# Altium footprint library STM32.PcbLib: 1 footprints
Each footprint in its own frame and in the unit in brackets; x right, y up, seen from the top. Pads: shape width x height; smd on the part's side, far side on the other; paste and mask are expansions set on the pad; w line width, h text height; cw(c..) or ccw(c..) is an arc to the next point about the centre after c.
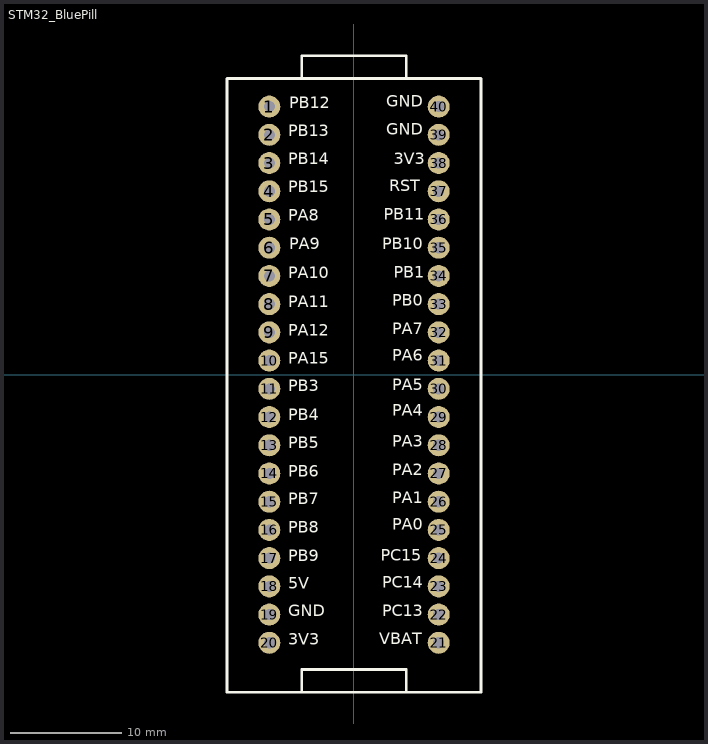
[diagram p0: the footprint, top view; thin cyan lines are the x and y axes]

## STM32_BluePill [mm]
pads (40):
  round 1.98 hole 1: 1(-7.62,24.13) 2(-7.62,21.59) 3(-7.62,19.05) 4(-7.62,16.51) 5(-7.62,13.97) 6(-7.62,11.43) 7(-7.62,8.89) 8(-7.62,6.35) 9(-7.62,3.81) 10(-7.62,1.27) 11(-7.62,-1.27) 12(-7.62,-3.81) 13(-7.62,-6.35) 14(-7.62,-8.89) 15(-7.62,-11.43) 16(-7.62,-13.97) 17(-7.62,-16.51) 18(-7.62,-19.05) 19(-7.62,-21.59) 20(-7.62,-24.13) 21(7.62,-24.13) 22(7.62,-21.59) 23(7.62,-19.05) 24(7.62,-16.51) 25(7.62,-13.97) 26(7.62,-11.43) 27(7.62,-8.89) 28(7.62,-6.35) 29(7.62,-3.81) 30(7.62,-1.27) 31(7.62,1.27) 32(7.62,3.81) 33(7.62,6.35) 34(7.62,8.89) 35(7.62,11.43) 36(7.62,13.97) 37(7.62,16.51) 38(7.62,19.05) 39(7.62,21.59) 40(7.62,24.13)
Top Overlay:
  lines w0.254: -11.43,-28.575 11.43,-28.575 11.43,26.67 -11.43,26.67 -11.43,-28.575 ; -4.699,-28.575 4.699,-28.575 4.699,-26.543 -4.699,-26.543 -4.699,-28.575 ; -4.699,26.67 4.699,26.67 4.699,28.702 -4.699,28.702 -4.699,26.67
  text "3V3" at -5.913,-24.669 h1.78
  text "PB9" at -5.913,-17.151 h1.78
  text "PB8" at -5.913,-14.585 h1.78
  text "GND" at -5.913,-22.104 h1.78
  text "5V" at -5.913,-19.614 h1.78
  text "PB7" at -5.913,-12.04 h1.78
  text "PA11" at -5.913,5.715 h1.78
  text "PB5" at -5.913,-6.991 h1.78
  text "PB6" at -5.913,-9.531 h1.78
  text "PA15" at -5.913,0.629 h1.78
  text "PA10" at -5.913,8.3 h1.78
  text "PB4" at -5.913,-4.445 h1.78
  text "PA9" at -5.842,10.942 h1.78
  text "PA8" at -5.913,13.482 h1.78
  text "PB3" at -5.913,-1.86 h1.78
  text "PA12" at -5.913,3.15 h1.78
  text "PA5" at 3.429,-1.758 h1.78
  text "PA3" at 3.429,-6.838 h1.78
  text "PA1" at 3.429,-11.938 h1.78
  text "PC15" at 2.413,-17.125 h1.78
  text "PA0" at 3.429,-14.331 h1.78
  text "PA4" at 3.429,-4.064 h1.78
  text "PA2" at 3.429,-9.398 h1.78
  text "PA6" at 3.429,0.909 h1.78
  text "PB10" at 2.54,10.942 h1.78
  text "PB1" at 3.556,8.382 h1.78
  text "PA7" at 3.429,3.302 h1.78
  text "PB0" at 3.429,5.862 h1.78
  text "PB11" at 2.667,13.589 h1.78
  text "PC14" at 2.54,-19.538 h1.78
  text "PC13" at 2.54,-22.078 h1.78
  text "VBAT" at 2.288,-24.638 h1.78
  text "PB15" at -5.913,16.047 h1.78
  text "PB14" at -5.913,18.593 h1.78
  text "RST" at 3.175,16.149 h1.78
  text "3V3" at 3.556,18.562 h1.78
  text "PB13" at -5.913,21.102 h1.78
  text "PB12" at -5.842,23.622 h1.78
  text "GND" at 2.921,21.229 h1.78
  text "GND" at 2.921,23.769 h1.78
3D body "MC STM32F103C8T6_pin.stp": height 12.08, standoff -5.92, extent -11,-27.75 11,26.25